# Altium schematic symbol library JST_Terminal.SchLib: 236 symbols (part 2 of 5)
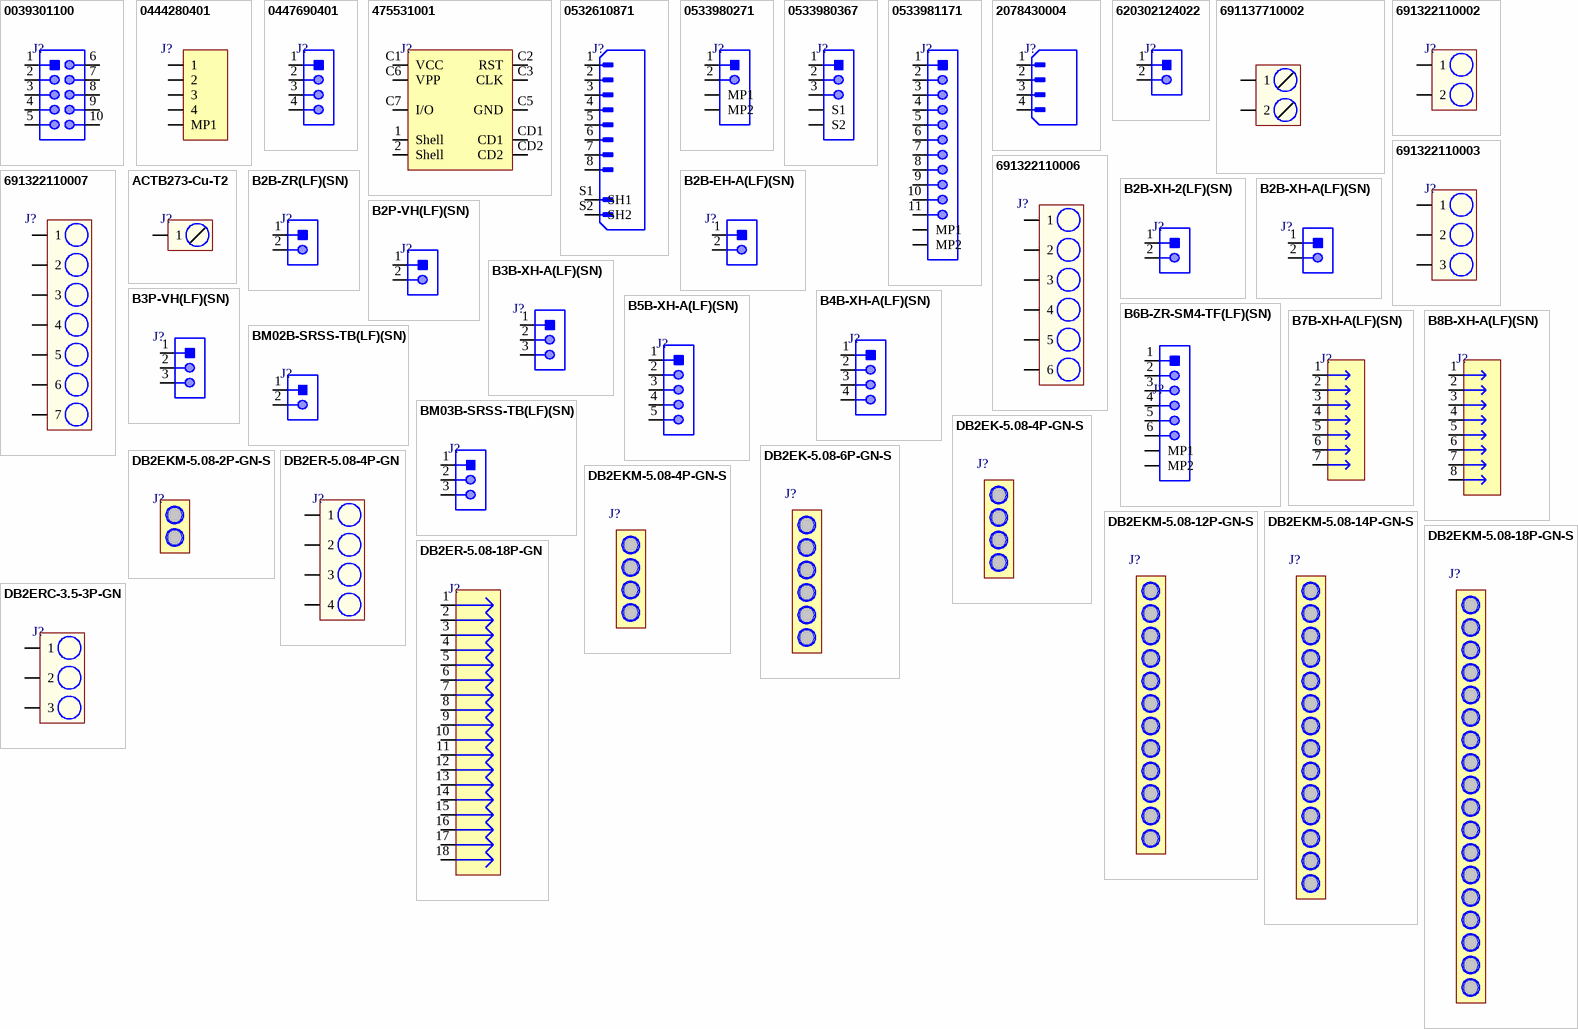
[diagram p6: symbols 0039301100 to DB2ERC-3.5-3P-GN]

## 0532610871
designator J?
CONN HEADER SMD R/A 8POS 1.25MM; Manufacturer: Molex; Manufacturer Part Number: 53261-0871; Contact Resistance: 20mR; Current Rating: 1A; Voltage Rating: 125V; Number of Positions: 8; Insulation Resistance: 100MR; Gender: Male; Glow Wire Compliant: Non-compliant; Item Type: R/A Male Blade Header; Supplier 1: Mouser; RoHS: Yes; Category: Headers and Wire Housings; Stock 1: 34151; Pricing 1: 1=0.89, 10=0.735, 50=0.735, 100=0.609, 1000=0.482, 10000=0.393 (USD); Mounting Technology: Surface Mount; Contact Material: Bronze,Brass,Tin; Contact Plating: Tin; Color: Natural; Housing Material: Nylon; Contact Shape: Rectangular; Contact Finish - Mating: TIN; Insulation Material: Nylon; Insulation Color: Natural; Housing Color: Natural; Min Operating Temperature: -40°C; Max Operating Temperature: 85°C; Number of Rows: 1; Voltage Rating (AC): 125V; Packaging: Tape and Reel; Package Quantity: 1000; Termination: Solder; Number of Contacts: 8; Working Voltage: 125V; Orientation: Right Angle; Number of Circuits: 8; Voltage Rating (DC): 125V; Connector Type: Header; Fastening Type: Detent; Series: PicoBlade; Contact Type: Male Blade; Lead Pitch: 1.25mm; Pitch: 1.25mm; Depth: 5.2mm; Radiation Hardening: No; Lead Free: Lead Free; Flammability Rating: UL94 V-0; RoHS Compliant: Yes; Reach SVHC Compliant: Unknown; Supplier Part Number 1: 538-53261-0871; LCSC Part Number: *
footprint 53261-0871
pins: 1, 2, 3, 4, 5, 6, 7, 8, S1 SH1, S2 SH2

## 0533980271
designator J?
CONN HEADER SMD 2POS 1.25MM; Manufacturer: Molex; Manufacturer Part Number: 53398-0271; Current Rating: 1A; Voltage Rating (AC): 125V; Contact Resistance: 20mR; Number of Positions: 2; Insulation Resistance: 100MR; Gender: Male; Glow Wire Compliant: Non-compliant; Item Type: R/A JST Connector; Supplier 1: Mouser; RoHS: Yes; Category: Headers and Wire Housings; Stock 1: 64394; Pricing 1: 1=0.62000, 10=0.52100, 50=0.52100, 100=0.40500, 1000=0.31000, 10000=0.25800 (USD); Mounting Technology: Surface Mount; Contact Material: Bronze,Brass,Tin; Contact Plating: Tin; Color: Natural; Housing Color: Natural; Housing Material: Nylon; Min Operating Temperature: -40°C; Max Operating Temperature: 85°C; Number of Rows: 1; Packaging: Tape and Reel; Package Quantity: 1000; Voltage Rating: 125V; Termination: Solder; Number of Contacts: 2; Working Voltage: 125V; Orientation: Vertical; Number of Circuits: 2; Voltage Rating (DC): 125V; Series: PicoBlade; Contact Type: Blade Pin; Pitch: 1.25mm; Radiation Hardening: No; Lead Free: Lead Free; Flammability Rating: UL94 V-0; RoHS Compliant: Yes; Reach SVHC Compliant: Unknown; ComponentLink1URL: https://datasheet.ciiva.com/30229/225140533980271-pcb-headers-30229043.pdf?src-supplier=Onlinecomponents.com; ComponentLink1Description: https://datasheet.ciiva.com/30229/225140533980271-pcb-headers-30229043.pdf?src-supplier=Onlinecomponents.com; Supplier Part Number 1: 538-53398-0271; LCSC Part Number: C122410
footprint 0533980271
pins: 1, 2, MP1, MP2

## 0533980367
designator J?
CONN HEADER SMD 3POS 1.25MM; Manufacturer: Molex; Manufacturer Part Number: 0533980367; Item Type: Wire To Board Connector; Supplier: Mouser; Supplier Part Number: 538-53398-0367; RoHS: Yes; Stock: 5361; Pricing: 1=1.41, 10=1.17, 50=1.17, 100=0.963, 1000=0.77, 10000=0.634 (USD); ComponentLink1URL: https://datasheet.ciiva.com/2944/533980367-sd-2944045.pdf?src-supplier=Digikey; ComponentLink1Description: https://datasheet.ciiva.com/2944/533980367-sd-2944045.pdf?src-supplier=Digikey; LCSC Part Number: C17555262
footprint 0533980367
pins: 1, 2, 3, S1, S2

## 0533981171
designator J?
CONN HEADER SMD 11POS 1.25MM; Manufacturer: Molex; Manufacturer Part Number: 53398-1171; Supplier: Mouser; Supplier Part Number: 538-53398-1171; RoHS: Yes; Category: Headers and Wire Housings; Stock: 2367; Pricing: 1=1.46, 10=1.2, 50=1.2, 100=0.998, 1000=0.798, 10000=0.648 (USD)
footprint 0533981171
pins: 1, 2, 3, 4, 5, 6, 7, 8, 9, 10, 11, MP1, MP2

## 2078430004
designator J?
HDR ASSBY FOR L1NK 250 - 1X4 CKT; Manufacturer: Molex; Manufacturer Part Number: 2078430004; Item Type: Headers and Wire Housings; Supplier: Mouser; Supplier Part Number: 538-207843-0004; RoHS: Yes; Stock: 5728; Pricing: 1=0.88, 10=0.745, 50=0.745, 100=0.67, 1000=0.548, 10000=0.426 (USD)
footprint 2078430004
pins: 1, 2, 3, 4

## 620302124022
designator J?
CONN HEADER SMD 2POS 2MM; Manufacturer: Wurth Electronics; Manufacturer Part Number: 620302124022; Current Rating: 2A; Voltage Rating: 100V; Number of Positions: 2; Insulation: Insulated; Insulation Resistance: 1GR; Gender: Male; Mated Stacking Heights: 8.78mm; Item Type: JST Connector; Supplier 1: Rs; RoHS: Yes; Category: Headers and Wire Housings; Stock 1: 1885; Pricing 1: 100=0.10920, 375=0.52400, 1500=0.50200, 3000=0.47800 (GBP); Mounting Technology: Surface Mount; Color: Beige,White; Contact Plating: Tin; Contact Material: Copper Alloy,Copper; Housing Material: Nylon; Contact Shape: Square; Contact Finish - Mating: TIN; Insulation Material: Nylon; Insulation Color: Beige; Min Operating Temperature: -25°C; Max Operating Temperature: 85°C; Package Quantity: 1; Number of Rows: 1; Packaging: Tape and Reel; Contact Gender: Male; Termination: SMD/SMT; Number of Contacts: 2; Connector Type: Header; Series: WR-WTB; Contact Type: Male Pin; Fastening Type: Detent; Length: 7.9mm; Width: 7.9mm; Height: 6.6mm; Pitch: 2mm; Contact Mating Length: 0.138inch; Flammability Rating: UL94 V-0; RoHS Compliant: Yes; ComponentLink1URL: https://datasheet.ciiva.com/8043/1442204-8043354.pdf?src-supplier=Element14; ComponentLink1Description: https://datasheet.ciiva.com/8043/1442204-8043354.pdf?src-supplier=Element14; ComponentLink2URL: https://datasheet.ciiva.com/738/6203xx124022-738610.pdf?src-supplier=Digi-Key; ComponentLink2Description: https://datasheet.ciiva.com/738/6203xx124022-738610.pdf?src-supplier=Digi-Key; ComponentLink3URL: https://datasheet.ciiva.com/48700/001088252-da-01-en-wr-wtb-2-00mm-620302124022-48700663.pdf?src-supplier=Conrad; ComponentLink3Description: https://datasheet.ciiva.com/48700/001088252-da-01-en-wr-wtb-2-00mm-620302124022-48700663.pdf?src-supplier=Conrad; Supplier Part Number 1: 8281320P
footprint 620302124022
pins: 1, 2

## 691137710002
designator J?
TERM BLK 2POS SIDE ENTRY 5MM PCB; Item Type: Terminal Block; Plating: Copper Alloy,ZINC PLATED; Number of Levels: 1; Number of Positions Per Level: 2; Current: 16A; Voltage: 300V; Number of Contacts: 2NUMBER; Wire Gauge (Max): 30AWG; Wire Gauge (Min): 12AWG; Supplier: Rs; Supplier Part Number: 1769908; RoHS: Yes; Category: Terminal Blocks; Stock: 65; Pricing: 500=0.218, 1000=0.202, 2500=0.189 (GBP); Mounting Technology: Through Hole; Pins: 2NUMBER; Color: Green; Housing Material: PC; Contact Material: 153,154ConductorMaterial; Min Operating Temperature: -30°C; Max Operating Temperature: 120°C; Termination: Screw; Series: WR-TBL Series 1377; Current Rating: 16A; Number of Rows: 1NUMBER; Voltage Rating: 300V; Height: 11.6mm; Lead Pitch: 5mm; RoHS Compliant: Yes; ComponentLink2URL: https://katalog.we-online.de/em/datasheet/691137710002.pdf?src-supplier=Digi-Key; ComponentLink2Description: https://katalog.we-online.de/em/datasheet/691137710002.pdf?src-supplier=Digi-Key
footprint 691137710002
pins: 1, 2

## 691322110002
designator J?
TERM BLOCK HDR 2POS 90DEG 3.5MM; Manufacturer: Wurth Electronics; Manufacturer Part Number: 691322110002; Item Type: Terminal Blocks; Number of Positions Per Level: 2; Number of Levels: 1; Current: 10A; Voltage: 300V; Supplier: Digikey; Supplier Part Number: 732-2769-ND; RoHS: Yes; Stock: 3605; Pricing: 1=0.4, 10=0.355, 50=0.306, 100=0.2745, 500=0.2574, 1000=0.2421 (USD); Mounting Technology: Through Hole; Contact Material: Brass; Color: Green; Housing Material: Nylon; Number of Rows: 1; Termination: Solder; Number of Contacts: 2; Series: WR-TBL Series 3221; Number of Positions: 2; Voltage Rating: 300V; Length: 10.5mm; Width: 8.1mm; Height: 9.2mm; Pitch: 3.5mm; Lead Free: Lead Free; RoHS Compliant: Yes; Flammability Rating: UL94 V-0; Reach SVHC Compliant: Unknown; ComponentLink1URL: https://datasheet.ciiva.com/8043/1442234-8043560.pdf?src-supplier=Element14; ComponentLink1Description: https://datasheet.ciiva.com/8043/1442234-8043560.pdf?src-supplier=Element14; ComponentLink2URL: https://datasheet.ciiva.com/795/6913221100xx-795775.pdf?src-supplier=Digikey; ComponentLink2Description: https://datasheet.ciiva.com/795/6913221100xx-795775.pdf?src-supplier=Digikey
footprint 691322110002
pins: 1, 2

## 691322110003
designator J?
TERM BLOCK HDR 3POS 3.50MM; Manufacturer: Wurth Elektronik; Manufacturer Part Number: 691322110003; Item Type: Terminal Blocks; Current: 10A; Gender: Male; Number of Contacts: 3; Number of Levels: 1; Pitch: 3.5052mm; Voltage: 300V; Supplier: DigiKey; Supplier Part Number: 732-2770-ND; RoHS: Compliant; Stock: 11796; Pricing: 1=0.66, 10=0.591, 50=0.5112, 100=0.4572, 250=0.4302, 750=0.4032 (USD); Color: Green; Contact Material: Brass; Height: 9.2mm; Lead Pitch: 3.5mm; Length: 10.5mm; Mounting Technology: Through Hole; Pins: 3; Number of Positions Per Level: 3; Number of Rows: 1; Packaging: Box; Termination: Solder; Width: 11.6mm; ComponentLink1URL: https://datasheet.octopart.com:443/691322110003-W%C3%BCrth-Elektronik-datasheet-111088189.pdf?src-supplier=Future+Electronics; ComponentLink1Description: https://datasheet.octopart.com:443/691322110003-W%C3%BCrth-Elektronik-datasheet-111088189.pdf?src-supplier=Future+Electronics; ComponentLink2URL: https://datasheet.octopart.com:443/691322110003-W%C3%BCrth-Elektronik-datasheet-12532410.pdf?src-supplier=Farnell; ComponentLink2Description: https://datasheet.octopart.com:443/691322110003-W%C3%BCrth-Elektronik-datasheet-12532410.pdf?src-supplier=Farnell; ComponentLink3URL: https://datasheet.octopart.com:443/691322110003-W%C3%BCrth-Elektronik-Midcom-datasheet-10414363.pdf?src-supplier=Farnell; ComponentLink3Description: https://datasheet.octopart.com:443/691322110003-W%C3%BCrth-Elektronik-Midcom-datasheet-10414363.pdf?src-supplier=Farnell; ComponentLink4URL: https://datasheet.octopart.com:443/691322110003-W%C3%BCrth-Elektronik-Midcom-datasheet-10405066.pdf?src-supplier=Newark; ComponentLink4Description: https://datasheet.octopart.com:443/691322110003-W%C3%BCrth-Elektronik-Midcom-datasheet-10405066.pdf?src-supplier=Newark
footprint 691322110003
pins: 1, 2, 3

## 691322110006
designator J?
TERM BLOCK HDR 6POS 3.50MM; Manufacturer: Wurth Elektronik; Manufacturer Part Number: 691322110006; Item Type: Terminal Blocks; Connector Type: PCB, Terminal Block; Current: 10A; Gender: Male; Number of Contacts: 6; Number of Levels: 1; Pitch: 3.5052mm; Voltage: 300V; Supplier: DigiKey; Supplier Part Number: 732-2773-ND; RoHS: Compliant; Stock: 1584; Pricing: 1=1.19, 10=1.064, 50=0.9198, 100=0.8226, 250=0.77312, 560=0.7245 (USD); Color: Green; Contact Gender: Male; Contact Material: Brass; Height: 9.2mm; Lead Pitch: 3.5mm; Length: 10.5mm; Mounting Technology: Through Hole; Pins: 6; Number of Positions Per Level: 6; Number of Rows: 1; Packaging: Box; Termination: Solder; Width: 22.1mm; ComponentLink1URL: https://datasheet.octopart.com:443/691322110006-W%C3%BCrth-Elektronik-datasheet-111088189.pdf?src-supplier=Farnell; ComponentLink1Description: https://datasheet.octopart.com:443/691322110006-W%C3%BCrth-Elektronik-datasheet-111088189.pdf?src-supplier=Farnell; ComponentLink2URL: https://datasheet.octopart.com:443/691322110006-W%C3%BCrth-Elektronik-datasheet-12532410.pdf?src-supplier=Farnell; ComponentLink2Description: https://datasheet.octopart.com:443/691322110006-W%C3%BCrth-Elektronik-datasheet-12532410.pdf?src-supplier=Farnell; ComponentLink3URL: https://datasheet.octopart.com:443/691322110006-W%C3%BCrth-Elektronik-Midcom-datasheet-10414363.pdf?src-supplier=Farnell; ComponentLink3Description: https://datasheet.octopart.com:443/691322110006-W%C3%BCrth-Elektronik-Midcom-datasheet-10414363.pdf?src-supplier=Farnell; ComponentLink4URL: https://datasheet.octopart.com:443/691322110006-W%C3%BCrth-Elektronik-Midcom-datasheet-10405066.pdf?src-supplier=Newark; ComponentLink4Description: https://datasheet.octopart.com:443/691322110006-W%C3%BCrth-Elektronik-Midcom-datasheet-10405066.pdf?src-supplier=Newark
footprint 691322110006
pins: 1, 2, 3, 4, 5, 6

## 691322110007
designator J?
TERM BLOCK HDR 7POS 3.50MM; Manufacturer: Wurth Elektronik; Manufacturer Part Number: 691322110007; Item Type: Terminal Blocks; Supplier: DigiKey; Stock: 385; Pricing: 1=1.67, 10=1.517, 50=1.4248, 100=1.3032, 465=1.05841 (USD); ComponentLink1URL: https://datasheet.octopart.com:443/691322110007-Wurth-Elektronik-datasheet-111088189.pdf?src-supplier=RS+(Formerly+Allied+Electronics); ComponentLink1Description: https://datasheet.octopart.com:443/691322110007-Wurth-Elektronik-datasheet-111088189.pdf?src-supplier=RS+(Formerly+Allied+Electronics)
footprint 691322110007
pins: 1, 2, 3, 4, 5, 6, 7

## ACTB273-Cu-T2
designator J?
7.5mm 240A 20mm M6 - PCB Welding Terminal ROHS; Manufacturer: CNNT(Shenzhen Connection Elec); Manufacturer Part Number: ACTB273-Cu-T2; Package: Custom; Item Type: PCB Welding Terminal; ComponentLink1Description: JLCPCB; ComponentLink1URL: https://jlcpcb.com/partdetail/5781967-ACTB273_CuT2/C5154233
footprint ACTB273-Cu-T2
pins: 1

## B2B-EH-A(LF)(SN)
designator J?
CONN HEADER VERT 2POS 2.5MM; Manufacturer: JST; Manufacturer Part Number: B2B-EH-A(LF)(SN); Current Rating: 3A; Voltage Rating: 250V; Contact Resistance: 20mR; Number of Positions: 2; Connector Type: Male Pin,Plug; Gender: Male; Item Type: JST Connector; Supplier 1: Digi-Key; Stock 1: 25023; Pricing 1: 1=0.14, 10=0.131, 100=0.0809, 500=0.06698, 1000=0.05861, 5000=0.05024, 10000=0.04884 (USD); Mount: Through Hole; Contact Material: Copper Alloy,Brass; Color: Natural; Contact Plating: Tin,Copper; Housing Color: White; Housing Material: Nylon; Min Operating Temperature: -25°C; Max Operating Temperature: 85°C; Number of Rows: 1; Fastening Type: Detent; Packaging: Bulk; Max Current Rating: 3A; Termination: Press-Fit; Number of Contacts: 2; Max Voltage Rating (AC): 250V; Orientation: Straight; Length: 7.5mm; Pitch: 2.5mm; Contact Mating Length: 0.13inch; Depth: 3.8mm; Lead Free: Lead Free; ComponentLink1URL: http://uk.rs-online.com/webdocs/05aa/0900766b805aab1f.pdf?src-supplier=RSComponents; ComponentLink1Description: http://uk.rs-online.com/webdocs/05aa/0900766b805aab1f.pdf?src-supplier=RSComponents; ComponentLink2URL: http://www.jst-mfg.com/product/pdf/eng/eEH.pdf?src-supplier=Digi-Key; ComponentLink2Description: http://www.jst-mfg.com/product/pdf/eng/eEH.pdf?src-supplier=Digi-Key; ComponentLink3URL: https://www.verical.com/server-webapp/html/getDatasheet?partID=639961&src-supplier=Verical; ComponentLink3Description: https://www.verical.com/server-webapp/html/getDatasheet?partID=639961&src-supplier=Verical; ComponentLink4URL: http://www1.futureelectronics.com/doc/JST/B2B-EH-A(LF)(SN).pdf?src-supplier=Future+Electronics; ComponentLink4Description: http://www1.futureelectronics.com/doc/JST/B2B-EH-A(LF)(SN).pdf?src-supplier=Future+Electronics; ComponentLink5URL: http://www.produktinfo.conrad.com/datenblaetter/1200000-1299999/001217319-da-01-en-STIFTLEISTE_GERADE_2_POL__RM_25MM.pdf?src-supplier=Conrad; ComponentLink5Description: http://www.produktinfo.conrad.com/datenblaetter/1200000-1299999/001217319-da-01-en-STIFTLEISTE_GERADE_2_POL__RM_25MM.pdf?src-supplier=Conrad; Supplier Part Number 1: 455-1611-ND; LCSC Part Number: C160262
footprint B2B-EH-A(LF)(SN).
pins: 1, 2

## B2B-XH-2(LF)(SN)
designator J?
CONN HEADER VERT 2POS 2.5MM; Manufacturer: JST; Manufacturer Part Number: B2B-XH-2(LF)(SN); Item Type: Headers; Number of Positions: 2; Voltage Rating: 250V; Supplier: Arrow Electronics; LCSC Part Number: C158014; RoHS: Yes; Stock: 480; Pricing: 1=0.0936, 10=0.0911, 25=0.0894, 50=0.0861, 100=0.0835, 1000=0.0764 (USD); Mounting Technology: Through Hole; Contact Material: Brass; Contact Shape: Square; Contact Finish - Mating: TIN; Insulation Material: Nylon; Insulation Color: Natural; Min Operating Temperature: -25°C; Max Operating Temperature: 85°C; Fastening Type: Detent; Series: XH; Packaging: Bulk; Contact Type: Male Pin; Number of Rows: 1; Termination: Press-Fit; Connector Type: Header; Flammability Rating: UL94 V-0
footprint B2B-XH-2(LF)(SN)
pins: 1, 2

## B2B-XH-A(LF)(SN)
designator J?
Conn Shrouded Header (4 Sides) HDR 2 POS 2.5mm Solder ST Thru-Hole Box; Manufacturer: JST; Manufacturer Part Number: B2B-XH-A(LF)(SN); Number of Positions: 2; Connector Type: Male Pin; Current Rating: 3A; Contact Resistance: 20mR; Voltage Rating: 250V; Insulation Resistance: 1GR; Wire/Cable Gauge: 22AWG; Item Type: JST Connector; Supplier 1: Farnell; RoHS: Yes; Category: FFC / FPC; Stock 1: 219240; Pricing 1: 100=0.06860, 1000=0.04800, 2500=0.04520, 5000=0.04230, 10000=0.03950, 20000=0.03660 (GBP); Mount: Through Hole; Contact Plating: Tin,Copper,Lead; Color: Natural; Contact Material: Brass; Housing Color: White; Housing Material: Polyamide; Min Operating Temperature: -25°C; Max Operating Temperature: 85°C; Number of Rows: 1; Packaging: Bulk; Termination: Solder; Fastening Type: Detent; Max Current Rating: 3A; Voltage Rating (AC): 250V; Max Voltage Rating (AC): 250V; Number of Contacts: 2; Max Voltage Rating (DC): 250V; Orientation: Straight; Length: 7.4mm; Pitch: 2.5mm; Lead Pitch: 2.5mm; Depth: 5.75mm; REACH SVHC: No SVHC; Lead Free: Lead Free; ComponentLink1URL: https://datasheet.ciiva.com/26894/getdatasheetpartid-640357-26894434.pdf?src-supplier=Verical; ComponentLink1Description: https://datasheet.ciiva.com/26894/getdatasheetpartid-640357-26894434.pdf?src-supplier=Verical; ComponentLink2URL: https://datasheet.ciiva.com/11746/0900766b8082653e-11746979.pdf?src-supplier=RSComponents; ComponentLink2Description: https://datasheet.ciiva.com/11746/0900766b8082653e-11746979.pdf?src-supplier=RSComponents; ComponentLink3URL: https://datasheet.ciiva.com/26894/getdatasheetpartid-385291-26894760.pdf?src-supplier=Verical; ComponentLink3Description: https://datasheet.ciiva.com/26894/getdatasheetpartid-385291-26894760.pdf?src-supplier=Verical; ComponentLink4URL: https://datasheet.ciiva.com/8052/5448-8052024.pdf?src-supplier=Element14; ComponentLink4Description: https://datasheet.ciiva.com/8052/5448-8052024.pdf?src-supplier=Element14; ComponentLink5URL: https://datasheet.ciiva.com/20207/523653-20207167.pdf?src-supplier=Rapid+Electronics; ComponentLink5Description: https://datasheet.ciiva.com/20207/523653-20207167.pdf?src-supplier=Rapid+Electronics; Supplier Part Number 1: 1516276; LCSC Part Number: C158012
footprint B2B-XH-A(LF)(SN)_
pins: 1, 2

## B2B-ZR(LF)(SN)
designator J?
CONN HEADER VERT 2POS 1.5MM; Manufacturer: JST; Manufacturer Part Number: B2B-ZR(LF)(SN); Body Plating: Tin; Number of Positions: 2; Contact Resistance: 30mR; Max Current Rating: 1A; Max Voltage Rating (AC): 50V; Gender: Male; Insulation Resistance: 500MR; Panel Thickness: 3.5mm; Item Type: JST Connector; Supplier 1: Digi-Key; RoHS: Yes; Category: Board to Board Connectors; Stock 1: 113095; Pricing 1: 1=0.17000, 10=0.13500, 100=0.09990, 500=0.08270, 1000=0.07237, 5000=0.06203, 10000=0.06031 (USD); Mount: Through Hole; Contact Plating: Copper,Tin; Color: White; Contact Material: Brass,Copper,Tin; Housing Color: Beige; Housing Material: Polyamide; Material: Nylon; Contact Shape: Circular; Insulation Material: Nylon; Insulation Color: Natural; Contact Finish - Mating: TIN; Min Operating Temperature: -25°C; Max Operating Temperature: 85°C; Number of Rows: 1; Packaging: Bulk; Connector Type: Header; Termination: Solder; Current Rating: 1A; Orientation: Straight; Fastening Type: Detent; Number of Contacts: 2; Series: ZH; Contact Type: Male Pin; Voltage Rating: 50V; Voltage Rating (AC): 50V; Voltage Rating (DC): 50V; Length: 4.5mm; Pitch: 1.5mm; Depth: 3.5mm; Lead Pitch: 1.5mm; Contact Mating Length: 0.094inch; Lead Free: Lead Free; REACH SVHC: No SVHC; Flammability Rating: UL94 V-0; ComponentLink1URL: https://datasheet.ciiva.com/11752/0900766b8082f580-11752167.pdf?src-supplier=RSComponents; ComponentLink1Description: https://datasheet.ciiva.com/11752/0900766b8082f580-11752167.pdf?src-supplier=RSComponents; ComponentLink2URL: https://datasheet.ciiva.com/25616/0900766b81147f94-25616906.pdf?src-supplier=RSComponents; ComponentLink2Description: https://datasheet.ciiva.com/25616/0900766b81147f94-25616906.pdf?src-supplier=RSComponents; ComponentLink3URL: https://datasheet.ciiva.com/26894/getdatasheetpartid-643133-26894438.pdf?src-supplier=Verical; ComponentLink3Description: https://datasheet.ciiva.com/26894/getdatasheetpartid-643133-26894438.pdf?src-supplier=Verical; ComponentLink4URL: https://datasheet.ciiva.com/712/ezh-712443.pdf?src-supplier=Digi-Key; ComponentLink4Description: https://datasheet.ciiva.com/712/ezh-712443.pdf?src-supplier=Digi-Key; ComponentLink5URL: https://datasheet.ciiva.com/8052/80551-8052026.pdf?src-supplier=Element14; ComponentLink5Description: https://datasheet.ciiva.com/8052/80551-8052026.pdf?src-supplier=Element14; Supplier Part Number 1: 455-1657-ND; LCSC Part Number: C158011
footprint B2B-ZR(LF)(SN)_
pins: 1, 2

## B2P-VH(LF)(SN)
designator J?
CONN HEADER VERT 2POS 3.96MM; Manufacturer: JST; Manufacturer Part Number: B2P-VH(LF)(SN); Item Type: Wire To Wire Connector; Supplier: Rs; Supplier Part Number: 8201147P; RoHS: Yes; Category: FFC / FPC; Stock: 71920; Pricing: 125=0.086, 500=0.084, 1250=0.082, 2500=0.08 (GBP); ComponentLink1URL: https://datasheet.ciiva.com/11752/0900766b80826546-11752094.pdf?src-supplier=Rs; ComponentLink1Description: https://datasheet.ciiva.com/11752/0900766b80826546-11752094.pdf?src-supplier=Rs; ComponentLink2URL: https://datasheet.ciiva.com/712/evh-712456.pdf?src-supplier=Digi-Key; ComponentLink2Description: https://datasheet.ciiva.com/712/evh-712456.pdf?src-supplier=Digi-Key; ComponentLink3URL: https://datasheet.ciiva.com/8052/80543-8052029.pdf?src-supplier=Element14; ComponentLink3Description: https://datasheet.ciiva.com/8052/80543-8052029.pdf?src-supplier=Element14; LCSC Part Number: C160315
footprint B2P-VH(LF)(SN)
pins: 1, 2

## B3B-XH-A(LF)(SN)
designator J?
CONN HEADER VERT 3POS 2.5MM; Manufacturer: JST; Manufacturer Part Number: B3B-XH-A(LF)(SN); Current Rating: 3A; Number of Positions: 3; Connector Type: Male Pin; Voltage Rating (AC): 250V; Contact Resistance: 20mR; Insulation Resistance: 1GR; Gender: Male; Wire/Cable Gauge: 22AWG; Item Type: JST Connector; Supplier 1: Farnell; RoHS: Yes; Category: Headers and Wire Housings; Stock 1: 114254; Pricing 1: 100=0.09250, 500=0.07700, 1000=0.06470, 2500=0.06340, 5000=0.06210, 10000=0.06080 (GBP); Mount: Through Hole; Contact Plating: Tin,Lead,Copper; Contact Material: Brass; Color: Natural; Housing Color: White; Housing Material: Polyamide; Min Operating Temperature: -25°C; Max Operating Temperature: 85°C; Number of Rows: 1; Packaging: Bulk; Termination: Press-Fit; Max Current Rating: 3A; Voltage Rating: 250V; Fastening Type: Detent; Number of Contacts: 3; Max Voltage Rating (AC): 250V; Max Voltage Rating (DC): 250V; Orientation: Straight; Length: 9.9mm; Pitch: 2.5mm; Lead Pitch: 2.5mm; Depth: 5.75mm; Lead Free: Lead Free; REACH SVHC: No SVHC; ComponentLink1URL: https://datasheet.ciiva.com/26894/getdatasheetpartid-640434-26894454.pdf?src-supplier=Verical; ComponentLink1Description: https://datasheet.ciiva.com/26894/getdatasheetpartid-640434-26894454.pdf?src-supplier=Verical; ComponentLink2URL: https://datasheet.ciiva.com/11746/0900766b8082653f-11746520.pdf?src-supplier=RSComponents; ComponentLink2Description: https://datasheet.ciiva.com/11746/0900766b8082653f-11746520.pdf?src-supplier=RSComponents; ComponentLink3URL: https://datasheet.ciiva.com/26894/getdatasheetpartid-440399-26894778.pdf?src-supplier=Verical; ComponentLink3Description: https://datasheet.ciiva.com/26894/getdatasheetpartid-440399-26894778.pdf?src-supplier=Verical; Supplier Part Number 1: 1516277; LCSC Part Number: C144394
footprint B3B-XH-A(LF)(SN)_
pins: 1, 2, 3

## B3P-VH(LF)(SN)
designator J?
1x3P VH 1 3.96mm 3 Brass Plugin,P=3.96mm Wire To Board / Wire To Wire Connector ROHS; Manufacture: JST Sales America; Manufacture part number: B3P-VH(LF)(SN); ComponentLink1Description: LCSC; ComponentLink1URL: https://www.lcsc.com/product-detail/Wire-To-Board-Wire-To-Wire-Connector_JST-Sales-America-B3P-VH-LF-SN_C160316.html; Pakage: Plugin,P=3.96mm; LCSC part number: C160316; Item type: Connector
footprint B3P-VH(LF)(SN)
pins: 1, 2, 3

## B4B-XH-A(LF)(SN)
designator J?
CONN HEADER VERT 4POS 2.5MM; Manufacturer: JST; Manufacturer Part Number: B4B-XH-A(LF)(SN); Current Rating: 3A; Gender: Male; Contact Resistance: 20mR; Voltage Rating (AC): 250V; Connector Type: Male Pin; Number of Positions: 4; Insulation Resistance: 1GR; Wire/Cable Gauge: 22AWG; Item Type: JST Connector; Supplier 1: Future Electronics; RoHS: Yes; Category: FFC / FPC; Pricing 1: 1=0.13000, 300=0.11300, 1000=0.11000, 3000=0.10700, 10000=0.10400 (USD); Mount: Through Hole; Contact Material: Brass; Material: Polyamide; Contact Plating: Tin,Copper,Lead; Color: Natural; Housing Material: Polyamide; Housing Color: White; Min Operating Temperature: -25°C; Max Operating Temperature: 85°C; Number of Rows: 1; Max Current Rating: 3A; Package Quantity: 500; Packaging: Bulk; Voltage Rating: 250V; Termination: Press-Fit; Max Voltage Rating (AC): 250V; Max Voltage Rating (DC): 250V; Number of Contacts: 4; Orientation: Straight; Length: 12.4mm; Pitch: 2.5mm; Lead Pitch: 2.5mm; Depth: 5.75mm; REACH SVHC: No SVHC; Lead Free: Lead Free; ComponentLink1URL: https://datasheet.ciiva.com/26894/getdatasheetpartid-455616-26894787.pdf?src-supplier=Verical; ComponentLink1Description: https://datasheet.ciiva.com/26894/getdatasheetpartid-455616-26894787.pdf?src-supplier=Verical; ComponentLink2URL: https://datasheet.ciiva.com/26924/getdatasheetpartid-640571-26924035.pdf?src-supplier=Verical; ComponentLink2Description: https://datasheet.ciiva.com/26924/getdatasheetpartid-640571-26924035.pdf?src-supplier=Verical; ComponentLink3URL: https://datasheet.ciiva.com/16203/b4b-xh-alfsn-16203642.pdf?src-supplier=Future+Electronics; ComponentLink3Description: https://datasheet.ciiva.com/16203/b4b-xh-alfsn-16203642.pdf?src-supplier=Future+Electronics; ComponentLink4URL: https://datasheet.ciiva.com/726/exh-726404.pdf?src-supplier=Digi-Key; ComponentLink4Description: https://datasheet.ciiva.com/726/exh-726404.pdf?src-supplier=Digi-Key; Supplier Part Number 1: 8134090; LCSC Part Number: C144395
footprint B4B-XH-A(LF)(SN).
pins: 1, 2, 3, 4

## B5B-XH-A(LF)(SN)
designator J?
Conn Shrouded Header HDR 5 POS 2.5mm Solder ST Thru-Hole Box; Manufacturer: JST; Manufacturer Part Number: B5B-XH-A(LF)(SN); Current Rating: 3A; Contact Resistance: 20mR; Voltage Rating (AC): 250V; Number of Positions: 5; Insulation Resistance: 1GR; Gender: Male; Wire/Cable Gauge: 22AWG; Contact Post Length: 0.134inch; Mated Stacking Heights: 9.8mm; Item Type: JST Connector; Supplier 1: Digi-Key; RoHS: Yes; Category: Headers and Wire Housings; Stock 1: 1949; Pricing 1: 1=0.25000, 10=0.23700, 100=0.16440, 500=0.13914, 1000=0.11383, 5000=0.10119, 10000=0.09170 (USD); Mount: Through Hole; Contact Material: Brass; Color: Natural; Contact Plating: Tin,Lead,Copper; Housing Color: White; Housing Material: Polyamide; Contact Shape: Square; Contact Finish - Mating: TIN; Insulation Material: Nylon; Insulation Color: Natural; Min Operating Temperature: -25°C; Max Operating Temperature: 85°C; Number of Rows: 1; Packaging: Bulk; Voltage Rating: 250V; Max Current Rating: 3A; Termination: Press-Fit; Fastening Type: Detent; Number of Contacts: 5; Max Voltage Rating (AC): 250V; Orientation: Straight; Connector Type: Header; Series: XH; Contact Type: Male Pin; Length: 14.9mm; Pitch: 2.5mm; Lead Pitch: 2.5mm; Depth: 5.75mm; Insulation Height: 0.276inch; REACH SVHC: No SVHC; Lead Free: Lead Free; Flammability Rating: UL94 V-0; ComponentLink1URL: https://datasheet.ciiva.com/26894/getdatasheetpartid-455618-26894798.pdf?src-supplier=Verical; ComponentLink1Description: https://datasheet.ciiva.com/26894/getdatasheetpartid-455618-26894798.pdf?src-supplier=Verical; ComponentLink2URL: https://datasheet.ciiva.com/11746/0900766b8082f55f-11746654.pdf?src-supplier=RSComponents; ComponentLink2Description: https://datasheet.ciiva.com/11746/0900766b8082f55f-11746654.pdf?src-supplier=RSComponents; ComponentLink3URL: https://datasheet.ciiva.com/26894/getdatasheetpartid-640991-26894479.pdf?src-supplier=Verical; ComponentLink3Description: https://datasheet.ciiva.com/26894/getdatasheetpartid-640991-26894479.pdf?src-supplier=Verical; ComponentLink4URL: https://datasheet.ciiva.com/8052/1684882-8052063.pdf?src-supplier=Element14; ComponentLink4Description: https://datasheet.ciiva.com/8052/1684882-8052063.pdf?src-supplier=Element14; ComponentLink5URL: https://datasheet.ciiva.com/20207/523653-20207174.pdf?src-supplier=Rapid+Electronics; ComponentLink5Description: https://datasheet.ciiva.com/20207/523653-20207174.pdf?src-supplier=Rapid+Electronics; ComponentLink6URL: https://datasheet.ciiva.com/724/exh-724390.pdf?src-supplier=Digi-Key; ComponentLink6Description: https://datasheet.ciiva.com/724/exh-724390.pdf?src-supplier=Digi-Key; Supplier Part Number 1: 455-2270-ND; LCSC Part Number: C157991
footprint B5B-XH-A(LF)(SN)_ (XH Header Male Pin 0.098"(2.50mm) 5 Through Hole,P=2.5mm Wire To Board / Wire To Wire Connector RoHS)
pins: 1, 2, 3, 4, 5

## B6B-ZR-SM4-TF(LF)(SN)
designator J?
CONN HEADER SMD 6POS 1.5MM; Manufacturer: JST; Manufacturer Part Number: B6B-ZR-SM4-TF(LF)(SN); Item Type: Connector; LCSC Part Number: C471473; Package: SMD,P=1.5mm; ComponentLink1Description: LCSC Link; ComponentLink1URL: https://www.lcsc.com/product-detail/Wire-To-Board-Connector_JST-B6B-ZR-SM4-TF-LF-SN_C471473.html
footprint B6B-ZR-SM4-TF(LF)(SN)
pins: 1, 2, 3, 4, 5, 6, MP1, MP2

## B7B-XH-A(LF)(SN)
designator J?
CONN HEADER VERT 7POS 2.5MM; Manufacturer: JST; Manufacturer Part Number: B7B-XH-A(LF)(SN); Number of Positions: 7; Contact Resistance: 20mR; Current Rating: 3A; Voltage Rating (AC): 250V; Insulation Resistance: 1GR; Wire/Cable Gauge: 22AWG; Mated Stacking Heights: 9.8mm; Item Type: Connector; Supplier: Rs; Supplier Part Number: 8201567P; RoHS: Yes; Category: Headers and Wire Housings; Stock: 5560; Pricing: 125=0.138, 500=0.128, 1250=0.122, 2500=0.114 (GBP); Mounting Technology: Through Hole; Contact Plating: Tin,Lead,Copper; Contact Material: Brass; Housing Color: White; Housing Material: Polyamide; Contact Shape: Square; Insulation Material: Nylon; Insulation Color: Natural; Contact Finish - Mating: TIN; Weight: 28.349523g; Min Operating Temperature: -25°C; Max Operating Temperature: 85°C; Number of Rows: 1; Packaging: Bulk; Termination: Solder; Connector Type: Header; Voltage Rating: 250V; Max Current Rating: 3A; Fastening Type: Detent; Number of Contacts: 7; Max Voltage Rating (AC): 250V; Orientation: Straight; Series: XH; Contact Type: Male Pin; Length: 19.9mm; Pitch: 2.5mm; Lead Pitch: 2.5mm; Depth: 5.75mm; Reach SVHC Compliant: No; Lead Free: Lead Free; Flammability Rating: UL94 V-0; ComponentLink1URL: https://datasheet.ciiva.com/11747/0900766b80826551-11747681.pdf?src-supplier=Rs; ComponentLink1Description: https://datasheet.ciiva.com/11747/0900766b80826551-11747681.pdf?src-supplier=Rs; ComponentLink2URL: https://datasheet.ciiva.com/26894/getdatasheetpartid-440406-26894811.pdf?src-supplier=Verical; ComponentLink2Description: https://datasheet.ciiva.com/26894/getdatasheetpartid-440406-26894811.pdf?src-supplier=Verical; LCSC Part Number: C144398
footprint B7B-XH-A(LF)(SN)
pins: 1, 2, 3, 4, 5, 6, 7

## B8B-XH-A(LF)(SN)
designator J?
CONN HEADER VERT 8POS 2.5MM; Manufacturer: JST; Manufacturer Part Number: B8B-XH-A(LF)(SN); Item Type: Wire to Board Connector; Contact Resistance: 20mR; Max Current Rating: 3A; Voltage Rating (AC): 250V; Number of Positions: 8; Insulation Resistance: 1GR; Wire/Cable Gauge: 22AWG; Supplier: Rs; LCSC Part Number: C157972; RoHS: Yes; Stock: 14940; Mounting Technology: Through Hole; Contact Material: Brass; Contact Plating: Tin,Lead,Copper; Color: Natural; Housing Color: White; Housing Material: Polyamide; Weight: 28.349523g; Min Operating Temperature: -25°C; Max Operating Temperature: 85°C; Number of Rows: 1; Current Rating: 3A; Voltage Rating: 250V; Packaging: Bulk; Termination: Press-Fit; Fastening Type: Detent; Max Voltage Rating (AC): 250V; Number of Contacts: 8; Orientation: Straight; Series: XH; Contact Type: Male Pin; Length: 22.4mm; Lead Pitch: 2.5mm; Pitch: 2.5mm; Depth: 5.75mm; Reach SVHC Compliant: No; Lead Free: 5697LeadFree; ComponentLink1URL: https://datasheet.ciiva.com/11747/0900766b80826540-11747580.pdf?src-supplier=Rs; ComponentLink1Description: https://datasheet.ciiva.com/11747/0900766b80826540-11747580.pdf?src-supplier=Rs; ComponentLink2URL: https://datasheet.ciiva.com/26894/getdatasheetpartid-440408-26894817.pdf?src-supplier=Verical; ComponentLink2Description: https://datasheet.ciiva.com/26894/getdatasheetpartid-440408-26894817.pdf?src-supplier=Verical
footprint B8B-XH-A(LF)(SN)
pins: 1, 2, 3, 4, 5, 6, 7, 8

## BM02B-SRSS-TB(LF)(SN)
designator J?
CONN HEADER SMD 2POS 1MM; Manufacturer: JST; Manufacturer Part Number: BM02B-SRSS-TB(LF)(SN); Item Type: Connectors; Gender: 29Gender; Supplier: Future Electronics; Supplier Part Number: 9104290; RoHS: Yes; Stock: 597; Pricing: 1=0.198 (USD); Housing Color: 50Colour; Housing Material: 4261ConductorMaterial; Orientation: 5495OrientationType; Lead Free: 5697LeadFree; ComponentLink1URL: https://datasheet.ciiva.com/8052/91630-8052077.pdf?src-supplier=Element14; ComponentLink1Description: https://datasheet.ciiva.com/8052/91630-8052077.pdf?src-supplier=Element14; ComponentLink2URL: https://datasheet.ciiva.com/16351/bm02b-srss-tb-lf-sn-16351949.pdf?src-supplier=Future+Electronics; ComponentLink2Description: https://datasheet.ciiva.com/16351/bm02b-srss-tb-lf-sn-16351949.pdf?src-supplier=Future+Electronics; LCSC Part Number: C160388
footprint BM02B-SRSS-TB(LF)(SN)
pins: 1, 2

## BM03B-SRSS-TB(LF)(SN)
designator J?
CONN HEADER SMD 3POS 1MM; Manufacturer: JST; Manufacturer Part Number: BM03B-SRSS-TB(LF)(SN); Item Type: Connectors; Current Rating: 1A; Number of Contacts: 3; Voltage Rating: 50V; Contact Resistance: 20mR; Insulation Resistance: 100MR; Gender: Male; Mated Stacking Heights: 4.9mm; Supplier: Mouser; LCSC Part Number: C160389; RoHS: Yes; Pricing: 1=0.47, 10=0.383, 50=0.383, 100=0.312, 1000=0.271, 10000=0.212 (USD); Mounting Technology: Surface Mount; Contact Material: Copper Alloy; Contact Plating: Tin,Lead; Color: Natural; Material: Polyamide; Housing Color: Natural; Housing Material: Nylon; Contact Shape: Square; Contact Finish - Mating: TIN; Insulation Material: Nylon; Insulation Color: Natural; Min Operating Temperature: -25°C; Max Operating Temperature: 85°C; Number of Rows: 1; Termination: Solder; Series: SR; Orientation: 5491OrientationType; Voltage Rating (AC): 50V; Packaging: Cut Tape; Number of Positions: 3; Connector Type: Header; Contact Type: Male Pin; Fastening Type: Pull; Lead Pitch: 1mm; Reach SVHC Compliant: No; Lead Free: Lead Free; Flammability Rating: UL94 V-0; ComponentLink1URL: http://www.farnell.com/datasheets/2082363.pdf?src-supplier=Farnell; ComponentLink1Description: http://www.farnell.com/datasheets/2082363.pdf?src-supplier=Farnell; ComponentLink2URL: http://www.farnell.com/datasheets/2082363.pdf?src-supplier=Element14; ComponentLink2Description: http://www.farnell.com/datasheets/2082363.pdf?src-supplier=Element14; ComponentLink3URL: https://datasheet.octopart.com/BM03B-SRSS-TB%28LF%29%28SN%29-JST-datasheet-5322443.pdf?src-supplier=Element14; ComponentLink3Description: https://datasheet.octopart.com/BM03B-SRSS-TB%28LF%29%28SN%29-JST-datasheet-5322443.pdf?src-supplier=Element14; ComponentLink4URL: http://www.farnell.com/datasheets/2082363.pdf?src-supplier=Newark; ComponentLink4Description: http://www.farnell.com/datasheets/2082363.pdf?src-supplier=Newark; ComponentLink5URL: http://www.jst-mfg.com/product/pdf/eng/eSR.pdf?src-supplier=Digikey; ComponentLink5Description: http://www.jst-mfg.com/product/pdf/eng/eSR.pdf?src-supplier=Digikey; ComponentLink6URL: https://datasheet.octopart.com/BM03B-SRSS-TB%28LF%29%28SN%29-JST-datasheet-120967.pdf?src-supplier=Future+Electronics; ComponentLink6Description: https://datasheet.octopart.com/BM03B-SRSS-TB%28LF%29%28SN%29-JST-datasheet-120967.pdf?src-supplier=Future+Electronics; ComponentLink7URL: http://www.jst-mfg.com/product/pdf/eng/eSR.pdf?src-supplier=Future+Electronics; ComponentLink7Description: http://www.jst-mfg.com/product/pdf/eng/eSR.pdf?src-supplier=Future+Electronics; ComponentLink8URL: https://datasheet.octopart.com/BM03B-SRSS-TB%28LF%29%28SN%29-JST-datasheet-12513377.pdf?src-supplier=LKR; ComponentLink8Description: https://datasheet.octopart.com/BM03B-SRSS-TB%28LF%29%28SN%29-JST-datasheet-12513377.pdf?src-supplier=LKR; ComponentLink9URL: http://datasheet.octopart.com/BM03B-SRSS-TB-%28LF%29%28SN%29-JST-datasheet-44103209.pdf?src-supplier=TME; ComponentLink9Description: http://datasheet.octopart.com/BM03B-SRSS-TB-%28LF%29%28SN%29-JST-datasheet-44103209.pdf?src-supplier=TME
footprint BM03B-SRSS-TB(LF)(SN)
pins: 1, 2, 3

## DB2EK-5.08-4P-GN-S
designator J?  (mechanical)
450V 17.5A 4 -40℃~+105℃ 1.5 1 14~28 5.08mm 1x4P Green Plug P=5.08mm Pluggable System Terminal Block ROHS; Manufacturer: DORABO; Manufacturer Part Number: DB2EK-5.08-4P-GN-S; Package: P=5.08mm; LCSC Part Number: C395757; Item Type: Terminal Block; ComponentLink1Description: LCSC; ComponentLink1URL: https://www.lcsc.com/product-detail/Pluggable-System-Terminal-Block_DORABO-DB2EK-5-08-4P-GN-S_C395757.html?s_z=n_DB2EK-5.08-4P-GN-S

## DB2EK-5.08-6P-GN-S
designator J?  (mechanical)
450V 17.5A 6 -40℃~+105℃ 1.5 1 14~28 5.08mm 1x6P Green Plug P=5.08mm Pluggable System Terminal Block ROHS; Manufacturer: DIBO; Manufacturer Part Number: DB2EK-5.08-6P-GN-S; Package: Push-Pull,P=5.08mm; LCSC Part Number: C395774; Item Type: Terminal Block; ComponentLink1Description: LCSC; ComponentLink1URL: https://www.lcsc.com/product-detail/Pluggable-System-Terminal-Block_DORABO-DB2EK-5-08-6P-GN-S_C395774.html

## DB2EKM-5.08-2P-GN-S
designator J?  (mechanical)
40℃~+105℃ 2.5 1 14~28 5.08mm 320V 20A 2 1x2P Green Plug Screw P=5.08mm Pluggable System Terminal Block ROHS; Manufacturer: DORABO; Manufacturer Part Number: DB2EKM-5.08-2P-GN-S; Package: P=5.08mm; LCSC Part Number: C395731; Item Type: Terminal Block; ComponentLink1Description: LCSC; ComponentLink1URL: https://lcsc.com/product-detail/Pluggable-System-Terminal-Block_DORABO-DB2EKM-5-08-2P-GN-S_C395731.html?s_z=n_DB2EKM-5.08-2P-GN-S

## DB2EKM-5.08-4P-GN-S
designator J?  (mechanical)
-40℃~+105℃ 2.5 1 14~28 5.08mm 320V 20A 4 1x4P Green Plug Screw Fixing P=5.08mm Pluggable System Terminal Block ROHS; Manufacturer: DORABO; Manufacturer Part Number: DB2EKM-5.08-4P-GN-S; Package: P=5.08mm; LCSC Part Number: C395756; Item Type: Terminal Block; ComponentLink1Description: LCSC; ComponentLink1URL: https://www.lcsc.com/product-detail/Pluggable-System-Terminal-Block_DORABO-DB2EKM-5-08-4P-GN-S_C395756.html?s_z=n_DB2EKM-5.08-4P-GN-S

## DB2EKM-5.08-12P-GN-S
designator J?  (mechanical)
-40℃~+105℃ 2.5 1 14~28 5.08mm 320V 20A 12 1x12P Green Plug Screw Fixing P=5.08mm Pluggable System Terminal Block ROHS; Manufacturer: DORABO; Manufacturer Part Number: DB2EKM-5.08-12P-GN-S; Package: P=5.08mm; LCSC Part Number: C395826; Item Type: Terminal Block; ComponentLink1Description: LCSC; ComponentLink1URL: https://www.lcsc.com/product-detail/Pluggable-System-Terminal-Block_DORABO-DB2EKM-5-08-12P-GN-S_C395826.html?s_z=n_DB2EKM-5.08-12P-GN-S

## DB2EKM-5.08-14P-GN-S
designator J?  (mechanical)
-40℃~+105℃ 2.5 1 14~28 5.08mm 320V 20A 14 1x14P Green Plug Screw Fixing P=5.08mm Pluggable System Terminal Block ROHS; Manufacturer: DORABO; Manufacturer Part Number: DB2EKM-5.08-14P-GN-S; Package: P=5.08mm; LCSC Part Number: C430521; Item Type: Terminal Block; ComponentLink1Description: LCSC; ComponentLink1URL: https://www.lcsc.com/product-detail/Pluggable-System-Terminal-Block_DORABO-DB2EKM-5-08-14P-GN-S_C430521.html?s_z=n_DB2EKM-5.08-14P-GN-S

## DB2EKM-5.08-18P-GN-S
designator J?  (mechanical)
-40℃~+105℃ 2.5 1 14~28 5.08mm 320V 20A 18 1x18P Green Plug Screw Fixing P=5.08mm Pluggable System Terminal Block ROHS; Manufacturer: DORABO; Manufacturer Part Number: DB2EKM-5.08-18P-GN-S; Package: P=5.08mm; LCSC Part Number: C430525; Item Type: Terminal Block; ComponentLink1Description: LCSC; ComponentLink1URL: https://www.lcsc.com/product-detail/Pluggable-System-Terminal-Block_DORABO-DB2EKM-5-08-18P-GN-S_C430525.html?s_z=n_DB2EKM-5.08-18P-GN-S

## DB2ER-5.08-4P-GN
designator J?
450V 17.5A 4 Bend -40℃~+105℃ 1 5.08mm Green Board Edge/Receptacle-Open Push-Pull,P=5.08mm Pluggable System Terminal Block ROHS; Manufacturer: DIBO; Manufacturer Part Number: DB2ER-5.08-4P-GN; Package: Push-Pull,P=5.08mm; LCSC Part Number: C395752; Item Type: Terminal Block; ComponentLink1Description: LCSC; ComponentLink1URL: https://www.lcsc.com/product-detail/Pluggable-System-span-style-background-color-ff0-Terminal-span-Block_DIBO-DB2ER-5-08-4P-GN_C395752.html
footprint DB2ER-5.08-4P-GN
pins: 1, 2, 3, 4

## DB2ER-5.08-18P-GN
designator J?
450V 17.5A 18 Bend -40℃~+105℃ 1 5.08mm 1x18P Green Board end/socket - Open type Push-Pull,P=5.08mm Pluggable System Terminal Block ROHS; Manufacturer: DIBO; Manufacturer Part Number: DB2ER-5.08-18P-GN; Package: Push-Pull,P=5.08mm; LCSC Part Number: C430511; Item Type: Terminal Block; ComponentLink1Description: LCSC; ComponentLink1URL: https://www.lcsc.com/product-detail/Pluggable-System-Terminal-Block_DORABO-DB2ER-5-08-18P-GN_C430511.html
footprint DB2ER-5.08-18P-GN
pins: 1, 2, 3, 4, 5, 6, 7, 8, 9, 10, 11, 12, 13, 14, 15, 16, 17, 18

## DB2ERC-3.5-3P-GN
designator J?
250V 10A 3 Bend -40℃~+105℃ 1 3.5mm 1x3P Green Board Edge/Receptacle-Close Push-Pull,P=3.5mm Pluggable System Terminal Block ROHS; Manufacturer: DORABO; Manufacturer Part Number: DB2ERC-3.5-3P-GN; Package: Push-Pull,P=5.08mm; LCSC Part Number: C430551; Item Type: Terminal Block; ComponentLink1Description: LCSC; ComponentLink1URL: https://www.lcsc.com/product-detail/Pluggable-System-span-style-background-color-ff0-Terminal-span-span-style-background-color-ff0-Block-span_DORABO-DB2ERC-3-5-3P-GN_C430551.html
footprint DB2ERC-3.5-3P-GN
pins: 1, 2, 3

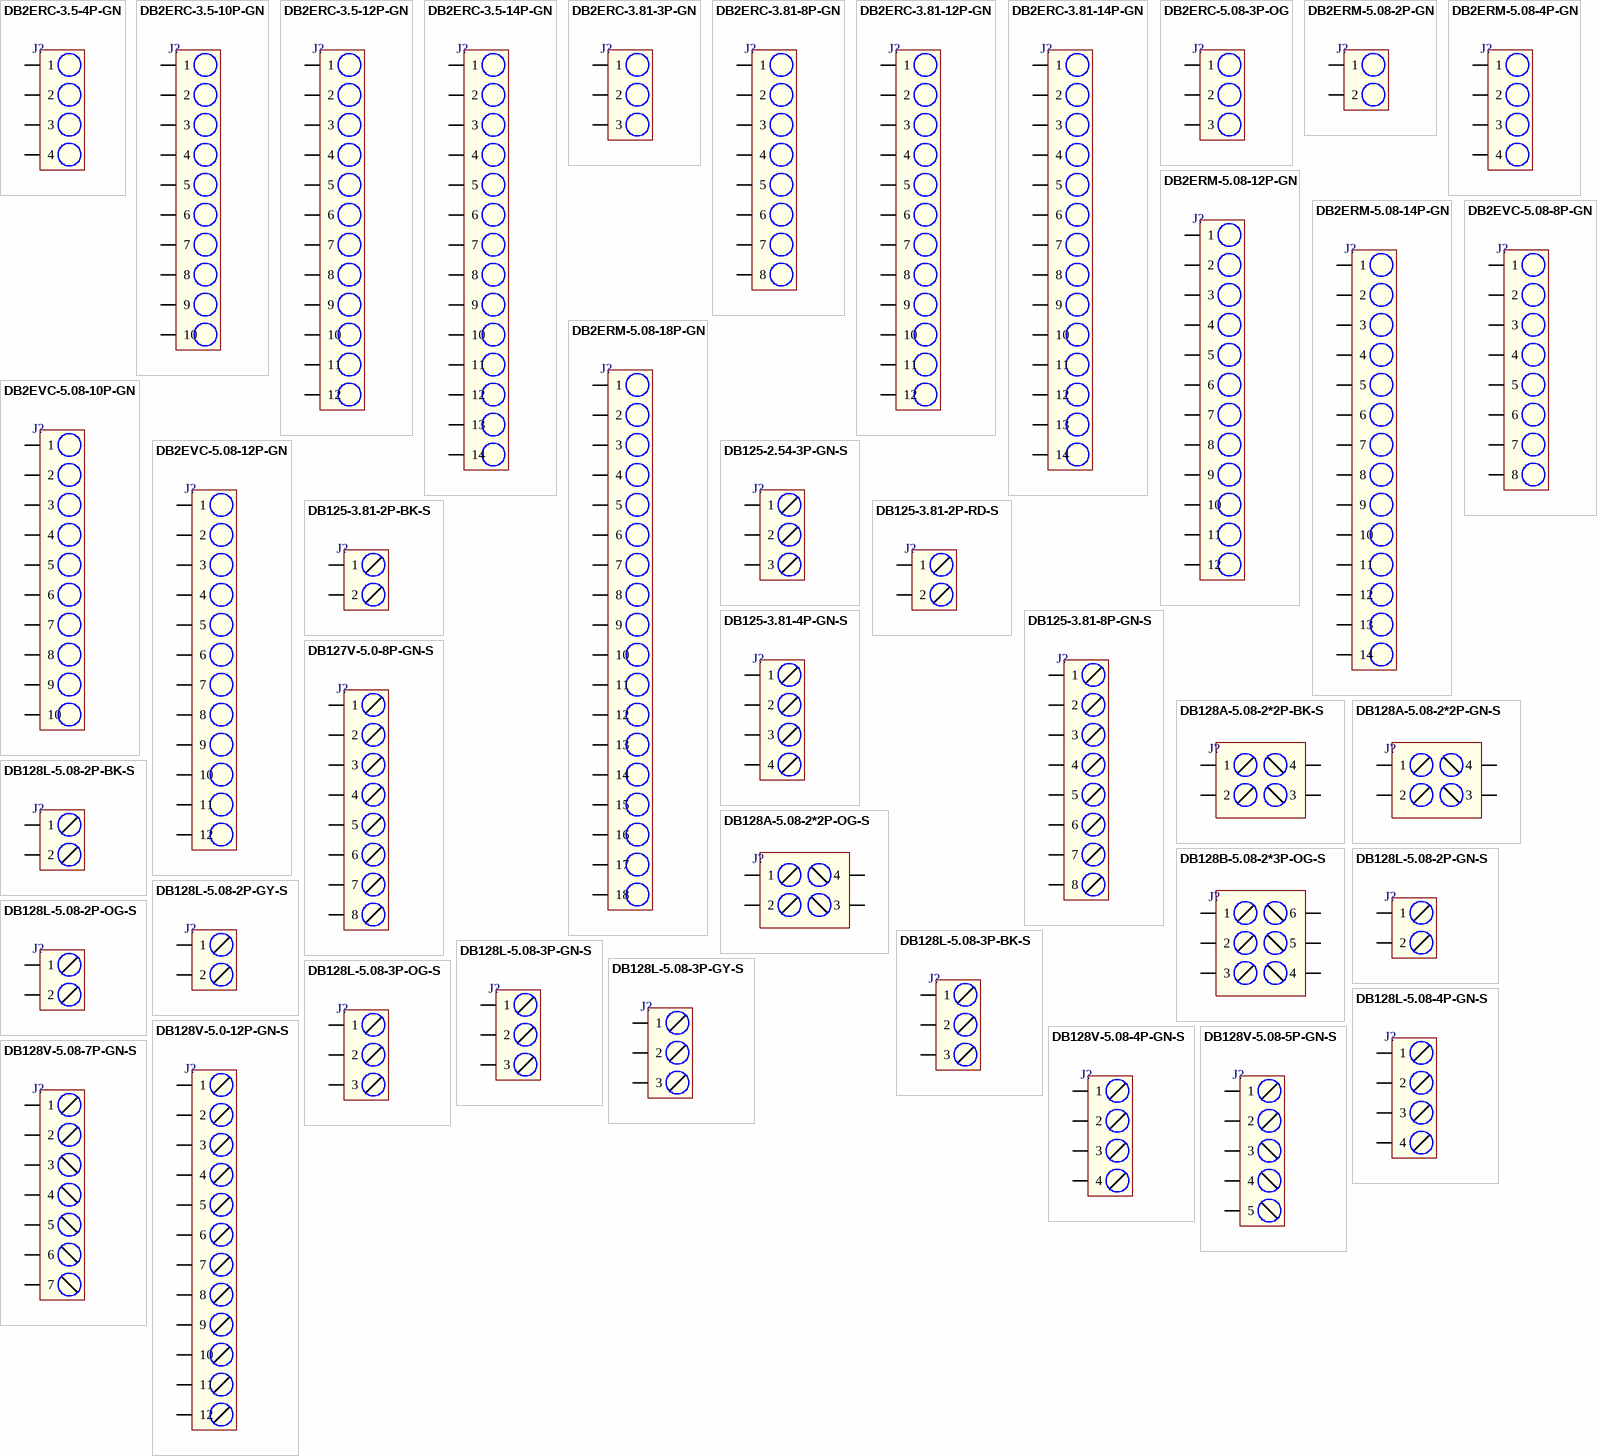
[diagram p2: symbols DB2ERC-3.5-4P-GN to DB128V-5.08-7P-GN-S]

## DB2ERC-3.5-4P-GN
designator J?
250V 10A 4 Bend -40℃~+105℃ 1 3.5mm 1x4P Green Receptacle-Close Push-Pull,P=3.5mm Pluggable System Terminal Block ROHS; Manufacturer: DORABO; Manufacturer Part Number: DB2ERC-3.5-4P-GN; Package: Push-Pull,P=3.5mm; LCSC Part Number: C395831; Item Type: Terminal Block; ComponentLink1Description: LCSC; ComponentLink1URL: https://www.lcsc.com/product-detail/Pluggable-System-Terminal-Block_DORABO-DB2ERC-3-5-4P-GN_C395831.html?s_z=n_DB2ERC-3.5-4P
footprint DB2ERC-3.5-4P-GN
pins: 1, 2, 3, 4

## DB2ERC-3.5-10P-GN
designator J?
250V 10A 10 Bend -40℃~+105℃ 1 3.5mm 1x10P Green Board Edge/Receptacle-Close Push-Pull,P=3.5mm Pluggable System Terminal Block ROHS; Manufacturer: DORABO; Manufacturer Part Number: DB2ERC-3.5-10P-GN; Package: Push-Pull,P=3.5mm; LCSC Part Number: C430562; Item Type: Terminal Block; ComponentLink1Description: LCSC; ComponentLink1URL: https://www.lcsc.com/product-detail/Pluggable-System-Terminal-Block_DORABO-DB2ERC-3-5-10P-GN_C430562.html
footprint DB2ERC-3.5-10P-GN
pins: 1, 2, 3, 4, 5, 6, 7, 8, 9, 10

## DB2ERC-3.5-12P-GN
designator J?
250V 10A 12 Bend -40℃~+105℃ 1 3.5mm 1x12P Green Board Edge/Receptacle-Close Push-Pull,P=3.5mm Pluggable System Terminal Block ROHS; Manufacturer: DORABO; Manufacturer Part Number: DB2ERC-3.5-12P-GN; Package: Push-Pull,P=3.5mm; LCSC Part Number: C395847; Item Type: Terminal Block; ComponentLink1Description: LCSC; ComponentLink1URL: https://www.lcsc.com/product-detail/Pluggable-System-Terminal-Block_DORABO-DB2ERC-3-5-12P-GN_C395847.html
footprint DB2ERC-3.5-12P-GN
pins: 1, 2, 3, 4, 5, 6, 7, 8, 9, 10, 11, 12

## DB2ERC-3.5-14P-GN
designator J?
250V 10A 14 Bend -40℃~+105℃ 1 3.5mm 1x14P Green Board Edge/Receptacle-Close Push-Pull,P=3.5mm Pluggable System Terminal Block ROHS; Manufacturer: DORABO; Manufacturer Part Number: DB2ERC-3.5-14P-GN; Package: Push-Pull,P=3.5mm; LCSC Part Number: C710256; Item Type: Terminal Block; ComponentLink1Description: LCSC; ComponentLink1URL: https://www.lcsc.com/product-detail/Pluggable-System-Terminal-Block_DORABO-DB2ERC-3-5-14P-GN_C710256.html
footprint DB2ERC-3.5-14P-GN
pins: 1, 2, 3, 4, 5, 6, 7, 8, 9, 10, 11, 12, 13, 14

## DB2ERC-3.81-3P-GN
designator J?
250V 10A 3 Bend -40℃~+105℃ 1 3.81mm 1x3P Green Board Edge/Receptacle-Close Push-Pull,P=3.81mm Pluggable System Terminal Block ROHS; Manufacturer: DORABO; Manufacturer Part Number: DB2ERC-3.81-3P-GN; Package: Push-Pull,P=3.81mm; LCSC Part Number: C395690; Item Type: Terminal Block; ComponentLink1Description: LCSC; ComponentLink1URL: https://www.lcsc.com/product-detail/Pluggable-System-Terminal-Block_DORABO-DB2ERC-3-81-3P-GN_C395690.html
footprint DB2ERC-3.81-3P-GN
pins: 1, 2, 3

## DB2ERC-3.81-8P-GN
designator J?
250V 10A 8 Bend -40℃~+105℃ 1 3.81mm 1x8P Green Board Edge/Receptacle-Close Push-Pull,P=3.81mm Pluggable System Terminal Block ROHS; Manufacturer: DORABO; Manufacturer Part Number: DB2ERC-3.81-8P-GN; Package: Push-Pull,P=3.81mm; LCSC Part Number: C395716; Item Type: Terminal Block; ComponentLink1Description: LCSC; ComponentLink1URL: https://www.lcsc.com/product-detail/Pluggable-System-Terminal-Block_DORABO-DB2ERC-3-81-8P-GN_C395716.html
footprint DB2ERC-3.81-8P-GN
pins: 1, 2, 3, 4, 5, 6, 7, 8

## DB2ERC-3.81-12P-GN
designator J?
250V 10A 12 Bend -40℃~+105℃ 1 3.81mm 1x12P Green Board Edge/Receptacle-Close Push-Pull,P=3.81mm Pluggable System Terminal Block ROHS; Manufacturer: DORABO; Manufacturer Part Number: DB2ERC-3.81-12P-GN; Package: Push-Pull,P=3.81mm; LCSC Part Number: C395728; Item Type: Terminal Block; ComponentLink1Description: LCSC; ComponentLink1URL: https://www.lcsc.com/product-detail/Pluggable-System-Terminal-Block_DORABO-DB2ERC-3-81-12P-GN_C395728.html
footprint DB2ERC-3.81-12P-GN
pins: 1, 2, 3, 4, 5, 6, 7, 8, 9, 10, 11, 12

## DB2ERC-3.81-14P-GN
designator J?
250V 10A 14 Bend -40℃~+105℃ 1 3.81mm 1x14P Green Receptacle-Close Push-Pull,P=3.81mm Pluggable System Terminal Block ROHS; Manufacturer: DORABO; Manufacturer Part Number: DB2ERC-3.81-14P-GN; Package: Push-Pull,P=3.81mm; LCSC Part Number: C430357; Item Type: Terminal; ComponentLink1Description: LCSC; ComponentLink1URL: https://www.lcsc.com/product-detail/Pluggable-System-Terminal-Block_DORABO-DB2ERC-3-81-14P-GN_C430357.html
footprint DB2ERC-3.81-14P-GN
pins: 1, 2, 3, 4, 5, 6, 7, 8, 9, 10, 11, 12, 13, 14

## DB2ERC-5.08-3P-OG
designator J?
320V 20A 3 Bend -40℃~+105℃ 1 5.08mm 1x3P Orange Board Edge/Receptacle-Close Push-Pull,P=5.08mm Pluggable System Terminal Block ROHS; Manufacturer: DIBO; Manufacturer Part Number: DB2ERC-5.08-3P-OG; Package: Push-Pull,P=5.08mm; LCSC Part Number: C430435; Item Type: Terminal Block; ComponentLink1Description: LCSC; ComponentLink1URL: https://www.lcsc.com/product-detail/Pluggable-System-span-style-background-color-ff0-Terminal-span-span-style-background-color-ff0-Block-span_DORABO-DB2ERC-5-08-3P-OG_C430435.html
footprint DB2ERC-5.08-3P-OG
pins: 1, 2, 3

## DB2ERM-5.08-2P-GN
designator J?
320V 20A 2 Right-Angle Pin -40℃~+105℃ 1 5.08mm 1x2P Green Board Side/Socket - Closed Screw Push-Pull,P=5.08mm Pluggable System Terminal Block ROHS; Manufacturer: DORABO; Manufacturer Part Number: DB2ERM-5.08-2P-GN; Package: Push-Pull,P=5.08mm; LCSC Part Number: C395735; Item Type: Terminal Block; ComponentLink1Description: LCSC; ComponentLink1URL: https://lcsc.com/product-detail/Pluggable-System-Terminal-Block_DORABO-DB2ERM-5-08-2P-GN_C395735.html?s_z=n_DB2ERM-5.08-2P-GN
footprint DB2ERM-5.08-2P-GN
pins: 1, 2

## DB2ERM-5.08-4P-GN
designator J?
320V 20A 4 Bend -40℃~+105℃ 1 5.08mm 1x4P Green Receptacle-Close Screw Fixing Push-Pull,P=5.08mm Pluggable System Terminal Block ROHS; Manufacturer: DORABO; Manufacturer Part Number: DB2ERM-5.08-4P-GN; Package: Push-Pull,P=5.08mm; LCSC Part Number: C395755; Item Type: Terminal Block; ComponentLink1Description: LCSC; ComponentLink1URL: https://www.lcsc.com/product-detail/Pluggable-System-Terminal-Block_DORABO-DB2ERM-5-08-4P-GN_C395755.html?s_z=n_DB2ERM-5.08-4P-GN
footprint DB2ERM-5.08-4P-GN
pins: 1, 2, 3, 4

## DB2ERM-5.08-12P-GN
designator J?
320V 20A 12 Bend -40℃~+105℃ 1 5.08mm 1x12P Green Receptacle-Close Screw Fixing Push-Pull,P=5.08mm Pluggable System Terminal Block ROHS; Manufacturer: DORABO; Manufacturer Part Number: DB2ERM-5.08-12P-GN; Package: Push-Pull,P=5.08mm; LCSC Part Number: C395827; Item Type: Terminal Block; ComponentLink1Description: LCSC; ComponentLink1URL: https://www.lcsc.com/product-detail/Pluggable-System-Terminal-Block_DORABO-DB2ERM-5-08-12P-GN_C395827.html?s_z=n_DB2ERM-5.08-12P-GN
footprint DB2ERM-5.08-12P-GN
pins: 1, 2, 3, 4, 5, 6, 7, 8, 9, 10, 11, 12

## DB2ERM-5.08-14P-GN
designator J?
320V 20A 14 Bend -40℃~+105℃ 1 5.08mm 1x14P Green Receptacle-Close Screw Fixing Push-Pull,P=5.08mm Pluggable System Terminal Block ROHS; Manufacturer: DORABO; Manufacturer Part Number: DB2ERM-5.08-14P-GN; Package: Push-Pull,P=5.08mm; LCSC Part Number: C430534; Item Type: Terminal Block; ComponentLink1Description: LCSC; ComponentLink1URL: https://www.lcsc.com/product-detail/Pluggable-System-Terminal-Block_DORABO-DB2ERM-5-08-14P-GN_C430534.html?s_z=n_DB2ERM-5.08-14P-GN
footprint DB2ERM-5.08-14P-GN
pins: 1, 2, 3, 4, 5, 6, 7, 8, 9, 10, 11, 12, 13, 14